# Altium footprint library QFN32_RSN_TEX.PcbLib: 1 footprints
Each footprint in its own frame and in the unit in brackets; x right, y up, seen from the top. Pads: shape width x height; smd on the part's side, far side on the other; paste and mask are expansions set on the pad; w line width, h text height; cw(c..) or ccw(c..) is an arc to the next point about the centre after c.
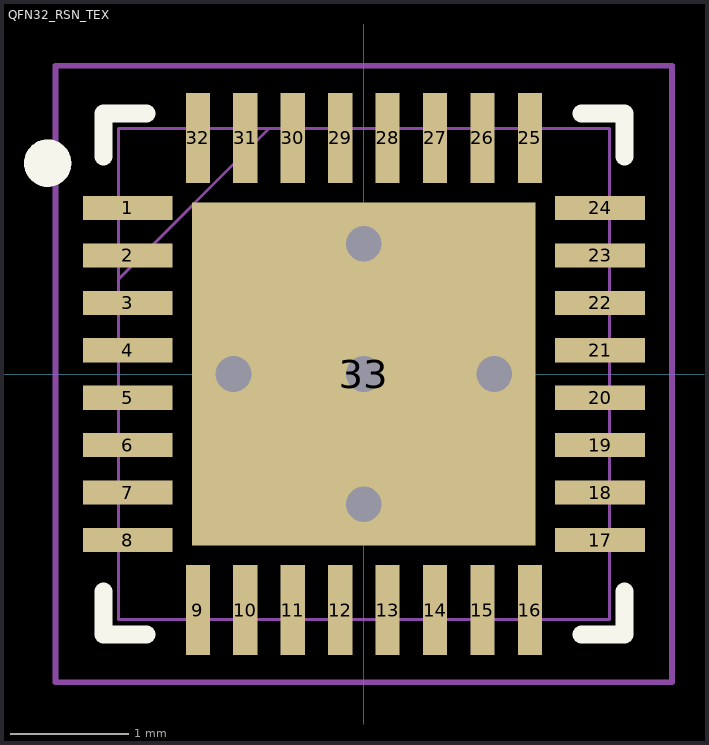
[diagram p0: the footprint, top view; thin cyan lines are the x and y axes]

## QFN32_RSN_TEX [mil]
pads (33):
  rect 29.81x8.03 smd: 1(-78.41,55.12) 2(-78.41,39.38) 3(-78.41,23.62) 4(-78.41,7.88) 5(-78.41,-7.88) 6(-78.41,-23.62) 7(-78.41,-39.38) 8(-78.41,-55.12) 17(78.41,-55.12) 18(78.41,-39.38) 19(78.41,-23.62) 20(78.41,-7.88) 21(78.41,7.88) 22(78.41,23.62) 23(78.41,39.38) 24(78.41,55.12)
  rect 8.03x29.81 smd: 9(-55.12,-78.41) 10(-39.38,-78.41) 11(-23.62,-78.41) 12(-7.88,-78.41) 13(7.88,-78.41) 14(23.62,-78.41) 15(39.38,-78.41) 16(55.12,-78.41) 25(55.12,78.41) 26(39.38,78.41) 27(23.62,78.41) 28(7.88,78.41) 29(-7.88,78.41) 30(-23.62,78.41) 31(-39.38,78.41) 32(-55.12,78.41)
  rect 114x114 smd: 33(0,0)
via 0,-43.31 diameter 23.62 hole 11.81
via 0,43.31 diameter 23.62 hole 11.81
via 43.31,0 diameter 23.62 hole 11.81
via -43.31,0 diameter 23.62 hole 11.81
via 0,0 diameter 23.62 hole 11.81
Top Overlay:
  circle w7.87: c-105,70 r3.94
  lines w6: -86.5,-72.24 -86.5,-86.5 -72.24,-86.5 ; -86.5,72.24 -86.5,86.5 -72.24,86.5 ; 72.24,-86.5 86.5,-86.5 86.5,-72.24 ; 72.24,86.5 86.5,86.5 86.5,72.24
Top Paste:
  region: -3.94,53.06 -53.06,53.06 -53.06,3.94 -3.94,3.94
  region: -3.94,-3.94 -53.06,-3.94 -53.06,-53.06 -3.94,-53.06
  region: 53.06,53.06 3.94,53.06 3.94,3.94 53.06,3.94
  region: 53.06,-3.94 3.94,-3.94 3.94,-53.06 53.06,-53.06
Mechanical 13:
  lines w1: -81.5,31.5 -31.5,81.5 ; -81.5,-81.5 81.5,-81.5 81.5,81.5 -81.5,81.5 -81.5,-81.5 ; -81.5,-60.12 -81.5,-50.12 -81.5,-60.12 ; -81.5,-44.38 -81.5,-34.38 -81.5,-44.38 ; -81.5,-28.62 -81.5,-18.62 -81.5,-28.62 ; -81.5,-12.88 -81.5,-2.88 -81.5,-12.88 ; -81.5,2.88 -81.5,12.88 -81.5,2.88 ; -81.5,18.62 -81.5,28.62 -81.5,18.62 ; -81.5,34.38 -81.5,44.38 -81.5,34.38 ; -81.5,50.12 -81.5,60.12 -81.5,50.12 ; -60.12,-81.5 -50.12,-81.5 -60.12,-81.5 ; -60.12,81.5 -50.12,81.5 -60.12,81.5 ; -44.38,-81.5 -34.38,-81.5 -44.38,-81.5 ; -44.38,81.5 -34.38,81.5 -44.38,81.5 ; -28.62,-81.5 -18.62,-81.5 -28.62,-81.5 ; -28.62,81.5 -18.62,81.5 -28.62,81.5 ; -12.88,-81.5 -2.88,-81.5 -12.88,-81.5 ; -12.88,81.5 -2.88,81.5 -12.88,81.5 ; 2.88,-81.5 12.88,-81.5 2.88,-81.5 ; 2.88,81.5 12.88,81.5 2.88,81.5 ; 18.62,-81.5 28.62,-81.5 18.62,-81.5 ; 18.62,81.5 28.62,81.5 18.62,81.5 ; 34.38,-81.5 44.38,-81.5 34.38,-81.5 ; 34.38,81.5 44.38,81.5 34.38,81.5 ; 50.12,-81.5 60.12,-81.5 50.12,-81.5 ; 50.12,81.5 60.12,81.5 50.12,81.5 ; 81.5,-60.12 81.5,-50.12 81.5,-60.12 ; 81.5,-44.38 81.5,-34.38 81.5,-44.38 ; 81.5,-28.62 81.5,-18.62 81.5,-28.62 ; 81.5,-12.88 81.5,-2.88 81.5,-12.88 ; 81.5,2.88 81.5,12.88 81.5,2.88 ; 81.5,18.62 81.5,28.62 81.5,18.62 ; 81.5,34.38 81.5,44.38 81.5,34.38 ; 81.5,50.12 81.5,60.12 81.5,50.12
Mechanical 15:
  lines w1.97: -102.36,-102.36 -102.36,102.36 102.36,102.36 102.36,-102.36 -102.36,-102.36
3D body "RSN0032B.stp": height 31.5, standoff 0, extent -78.74,-78.74 78.74,78.74